# Altium footprint library chipfc_libs.PCBLIB: 315 footprints (part 13 of 20)
Each footprint in its own frame and in the unit in brackets; x right, y up, seen from the top. Pads: shape width x height; smd on the part's side, far side on the other; paste and mask are expansions set on the pad; w line width, h text height; cw(c..) or ccw(c..) is an arc to the next point about the centre after c.
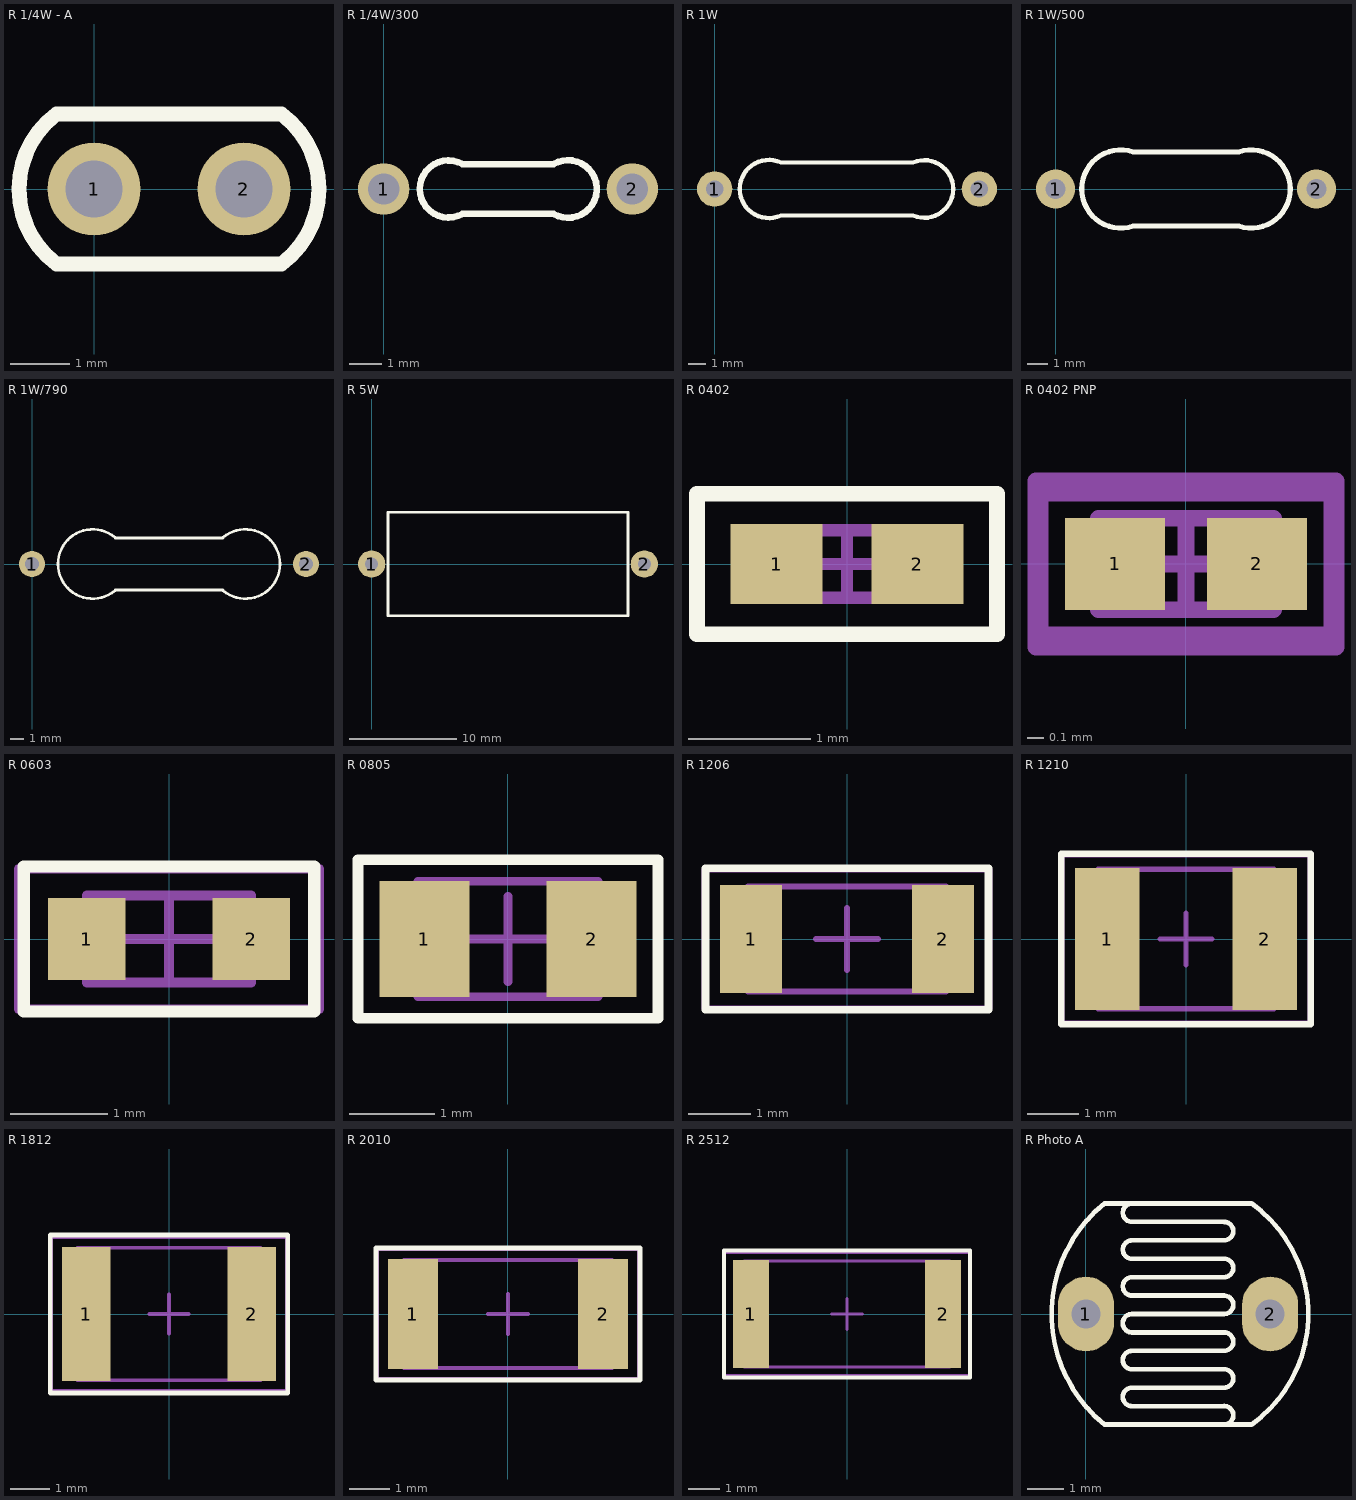
[diagram p12: the footprints below, top view; thin cyan lines are the x and y axes]

## R 1/4W - A [mil]
pads (2):
  round 62 hole 38: 1(0,0) 2(100,0)
Top Overlay:
  lines w10: -25,-50 cw(c12.5,0) -25,50 125,50 cw(c87.5,0) 125,-50 -25,-50

## R 1/4W/300 [mil] "Through hole resitor, axial 300mils, 1/4W"
pads (2):
  round 62 hole 38: 1(0,0) 2(300,0)
Top Overlay:
  lines w8: 95,-30 cw(c78.05,0) 95,30 205,30 cw(c222.5,0) 205,-30 95,-30
3D body "User Library-R-Axial-0_25W-7_62.step": height 97.42, standoff -146.85, extent -11.8,-47.37 311.82,47.38

## R 1W [mil] "Through hole resitor, axial 600mils, 1W"
pads (2):
  round 80 / inner round 60 / far side round 80 hole 39: 1(0,0) 2(600,0)
Top Overlay:
  lines w10: 150,-60 cw(c122.77,0) 150,60 450,60 cw(c475.55,0) 450,-60 150,-60

## R 1W/500 [mil] "Through hole resitor, axial 500mils, 1W"
pads (2):
  round 75 / inner round 60 / far side round 80 hole 39: 1(0,0) 2(500,0)
Top Overlay:
  lines w10: 148.72,-71.15 cw(c125,0) 148.72,71.15 351.28,71.15 cw(c375,0) 351.28,-71.15 148.72,-71.15
3D body "User Library-Res50 1W SilCoat.step": height 177.95, standoff -78.74, extent -14.76,-88.58 514.77,88.58

## R 1W/790 [mil] "Through hole resitor, axial 600mils, 1W"
pads (2):
  round 75 / inner round 60 / far side round 80 hole 39: 1(0,0) 2(790,0)
Top Overlay:
  lines w8: 239.02,-76.82 cw(c175,0) 239.02,76.82 ; 240,-75 550.98,-75 ; 240,75 550.98,75 ; 550.98,-76.82 ccw(c615,0) 550.98,76.82
3D body "User Library-res_20x20.STEP": height 198.43, standoff -85.04, extent -13.9,-98.43 805,98.43

## R 5W [mm]
pads (2):
  round 2.54 hole 1.2: 1(0,0) 2(25.4,0)
Top Overlay:
  lines w0.254: 1.524,-4.826 1.524,4.826 23.876,4.826 23.876,-4.826 1.524,-4.826
3D body "User Library-Resistor 5W Length 22mm, pitch 1in.step": height 9.07, standoff -5.37, extent -0.4,-4.75 25.8,4.75

## R 0402 [mm] "Chip Resistor, 2-Leads, Body 1.0x0.5mm, IPC Medium Density"
height 0.4
pads (2):
  rect 0.75x0.65 smd: 1(-0.575,0) 2(0.575,0)
Top Overlay:
  lines w0.127: -1.225,-0.575 1.225,-0.575 1.225,0.575 -1.225,0.575 -1.225,-0.575
Mechanical 13:
  lines w0.1: -0.525,-0.275 0.525,-0.275 0.525,0.275 -0.525,0.275 -0.525,-0.275
Mechanical 15:
  lines w0.1: -0.275,0 0.275,0 ; 0,-0.275 0,0.275 ; -1.225,-0.575 1.225,-0.575 1.225,0.575 -1.225,0.575 -1.225,-0.575
3D body "User Library-Chip Resistor2 (1).step": height 0.4, standoff 0, extent -0.5,-0.25 0.5,0.25

## R 0402 PNP [mm] "Chip Capacitor, 2-Leads, Body 1.0x0.5mm, IPC Medium Density"
height 0.55
pads (2):
  rect 0.6x0.55 smd: 1(-0.425,0) 2(0.425,0)
Mechanical 13:
  lines w0.1: -0.525,-0.275 -0.525,0.275 0.525,0.275 0.525,-0.275 -0.525,-0.275
Mechanical 15:
  lines w0.1: -0.275,0 0.275,0 ; 0,-0.275 0,0.275 ; -0.875,-0.425 -0.875,0.425 0.875,0.425 0.875,-0.425 -0.875,-0.425
Mechanical 31:
  lines w0.1: -0.9,-0.5 -0.9,0.5 0.9,0.5 0.9,-0.5 -0.9,-0.5
3D body "User Library-Chip Resistor2 (1).step": height 0.4, standoff 0, extent -0.5,-0.25 0.5,0.25

## R 0603 [mm] "Chip Resistor, 2-Leads, Body 1.6x0.8mm, IPC Medium Density"
height 0.55
pads (2):
  rect 0.8x0.85 smd: 1(-0.85,0) 2(0.85,0)
Top Overlay:
  lines w0.127: -1.5,-0.75 -1.5,0.75 1.5,0.75 1.5,-0.75 -1.5,-0.75
Mechanical 13:
  lines w0.1: -0.85,-0.45 -0.85,0.45 0.85,0.45 0.85,-0.45 -0.85,-0.45
Mechanical 15:
  lines w0.1: -0.45,0 0.45,0 ; 0,-0.45 0,0.45 ; -1.55,-0.725 -1.55,0.725 1.55,0.725 1.55,-0.725 -1.55,-0.725
3D body "User Library-Chip Resistor2.step": height 0.5, standoff 0, extent -0.8,-0.4 0.8,0.4

## R 0805 [mm] "Chip Resistor, 2-Leads, Body 2.0x1.3mm, IPC Medium Density"
height 0.5
pads (2):
  rect 1.05x1.35 smd: 1(-0.975,0) 2(0.975,0)
Top Overlay:
  lines w0.127: -1.75,-0.925 1.75,-0.925 1.75,0.925 -1.75,0.925 -1.75,-0.925
Mechanical 13:
  lines w0.1: -1.05,-0.675 -1.05,0.675 1.05,0.675 1.05,-0.675 -1.05,-0.675
Mechanical 15:
  lines w0.1: -0.5,0 0.5,0 ; 0,-0.5 0,0.5 ; -1.75,-0.925 -1.75,0.925 1.75,0.925 1.75,-0.925 -1.75,-0.925
3D body "RESC2012X50N.step": height 0.5, standoff 0, extent -1,-0.61 1,0.59

## R 1206 [mm] "Chip Resistor, 2-Leads, Body 3.1x1.6mm, IPC Medium Density"
height 0.65
pads (2):
  rect 1x1.75 smd: 1(-1.55,0) 2(1.55,0)
Top Overlay:
  lines w0.127: -2.286,-1.143 2.286,-1.143 2.286,1.143 -2.286,1.143 -2.286,-1.143
Mechanical 13:
  lines w0.1: -1.6,-0.85 -1.6,0.85 1.6,0.85 1.6,-0.85 -1.6,-0.85
Mechanical 15:
  lines w0.1: -0.5,0 0.5,0 ; 0,-0.5 0,0.5 ; -2.3,-1.125 -2.3,1.125 2.3,1.125 2.3,-1.125 -2.3,-1.125
3D body "User Library-Chip Resistor2.step": height 0.6, standoff 0, extent -1.6,-0.8 1.6,0.8

## R 1210 [mm] "Chip Resistor, 2-Leads, Body 3.2x2.5mm, IPC Medium Density"
height 0.7
pads (2):
  rect 1.25x2.75 smd: 1(-1.525,0) 2(1.525,0)
Top Overlay:
  lines w0.127: -2.413,-1.651 2.413,-1.651 2.413,1.651 -2.413,1.651 -2.413,-1.651
Mechanical 13:
  lines w0.1: -1.7,-1.35 1.7,-1.35 1.7,1.35 -1.7,1.35 -1.7,-1.35
Mechanical 15:
  lines w0.1: -0.5,0 0.5,0 ; 0,-0.5 0,0.5 ; -2.4,-1.625 2.4,-1.625 2.4,1.625 -2.4,1.625 -2.4,-1.625
3D body "User Library-Chip Resistor2.step": height 0.7, standoff 0, extent -1.6,-1.25 1.6,1.25

## R 1812 [mm] "Chip Resistor, 2-Leads, Body 4.5x3.2mm, IPC Medium Density"
height 0.7
pads (2):
  rect 1.25x3.45 smd: 1(-2.125,0) 2(2.125,0)
Top Overlay:
  lines w0.127: -3.048,-2.032 -3.048,2.032 3.048,2.032 3.048,-2.032 -3.048,-2.032
Mechanical 13:
  lines w0.1: -2.35,-1.7 2.35,-1.7 2.35,1.7 -2.35,1.7 -2.35,-1.7
Mechanical 15:
  lines w0.1: -0.5,0 0.5,0 ; 0,-0.5 0,0.5 ; -3.025,-1.975 3.025,-1.975 3.025,1.975 -3.025,1.975 -3.025,-1.975
3D body "User Library-Chip Resistor2 (1).step": height 0.7, standoff 0, extent -2.25,-1.6 2.25,1.6

## R 2010 [mm] "Chip Resistor, 2-Leads, Body 5.0x2.5mm, IPC Medium Density"
height 0.8
pads (2):
  rect 1.25x2.75 smd: 1(-2.375,0) 2(2.375,0)
Top Overlay:
  lines w0.127: -3.302,-1.651 -3.302,1.651 3.302,1.651 3.302,-1.651 -3.302,-1.651
Mechanical 13:
  lines w0.1: -2.6,-1.35 -2.6,1.35 2.6,1.35 2.6,-1.35 -2.6,-1.35
Mechanical 15:
  lines w0.1: -0.5,0 0.5,0 ; 0,-0.5 0,0.5 ; -3.275,-1.625 -3.275,1.625 3.275,1.625 3.275,-1.625 -3.275,-1.625
3D body "User Library-Chip Resistor2 (2).step": height 0.7, standoff 0, extent -2.5,-1.25 2.5,1.25

## R 2512 [mm] "Chip Resistor, 2-Leads, Body 6.4x3.2mm, IPC Medium Density"
height 0.8
pads (2):
  rect 1.15x3.45 smd: 1(-3.075,0) 2(3.075,0)
Top Overlay:
  lines w0.127: -3.937,-2.032 -3.937,2.032 3.937,2.032 3.937,-2.032 -3.937,-2.032
Mechanical 13:
  lines w0.1: -3.3,-1.7 3.3,-1.7 3.3,1.7 -3.3,1.7 -3.3,-1.7
Mechanical 15:
  lines w0.1: -0.5,0 0.5,0 ; 0,-0.5 0,0.5 ; -3.925,-1.975 3.925,-1.975 3.925,1.975 -3.925,1.975 -3.925,-1.975
3D body "User Library-Chip Resistor2 (3).step": height 0.76, standoff 0, extent -3.2,-1.6 3.2,1.6

## R Photo A [mil] "Photoresistor"
pads (2):
  oval 60x80 / inner round 62 / far side oval 60x80 hole 31: 1(0,0) 2(196.83,0)
Top Overlay:
  lines w5: 49.2,-78.73 147.62,-78.73 ccw(c147.62,-68.88) 147.62,-59.03 49.2,-59.05 cw(c49.2,-49.2) 49.2,-39.35 147.62,-39.37 ccw(c147.62,-29.52) 147.62,-19.67 ; 49.2,-78.72 ccw(c49.2,-88.57) 49.2,-98.42 147.62,-98.42 cw(c147.62,-108.25) 147.62,-118.1 ; 49.2,78.72 ccw(c49.2,68.88) 49.2,59.05 147.62,59.05 cw(c147.62,49.2) 147.62,39.37 49.2,39.37 ccw(c49.2,29.52) 49.2,19.68 147.62,19.68 ; 49.2,78.73 147.62,78.73 ccw(c147.62,88.57) 147.62,98.4 49.2,98.42 cw(c49.2,108.25) 49.2,118.08 ; 147.62,-19.68 49.2,-19.68 cw(c49.2,-9.83) 49.2,0.02 147.62,0 ccw(c147.62,9.83) 147.62,19.67 ; 19.68,-118.12 cw(c115.25,0) 19.68,118.12 177.15,118.12 cw(c92.13,0) 177.15,-118.12 19.68,-118.12